# Altium schematic symbol library Componentes_Eletricos.SchLib: 98 symbols
Pins are listed as number, name and electrical type; pins without a type are passive.

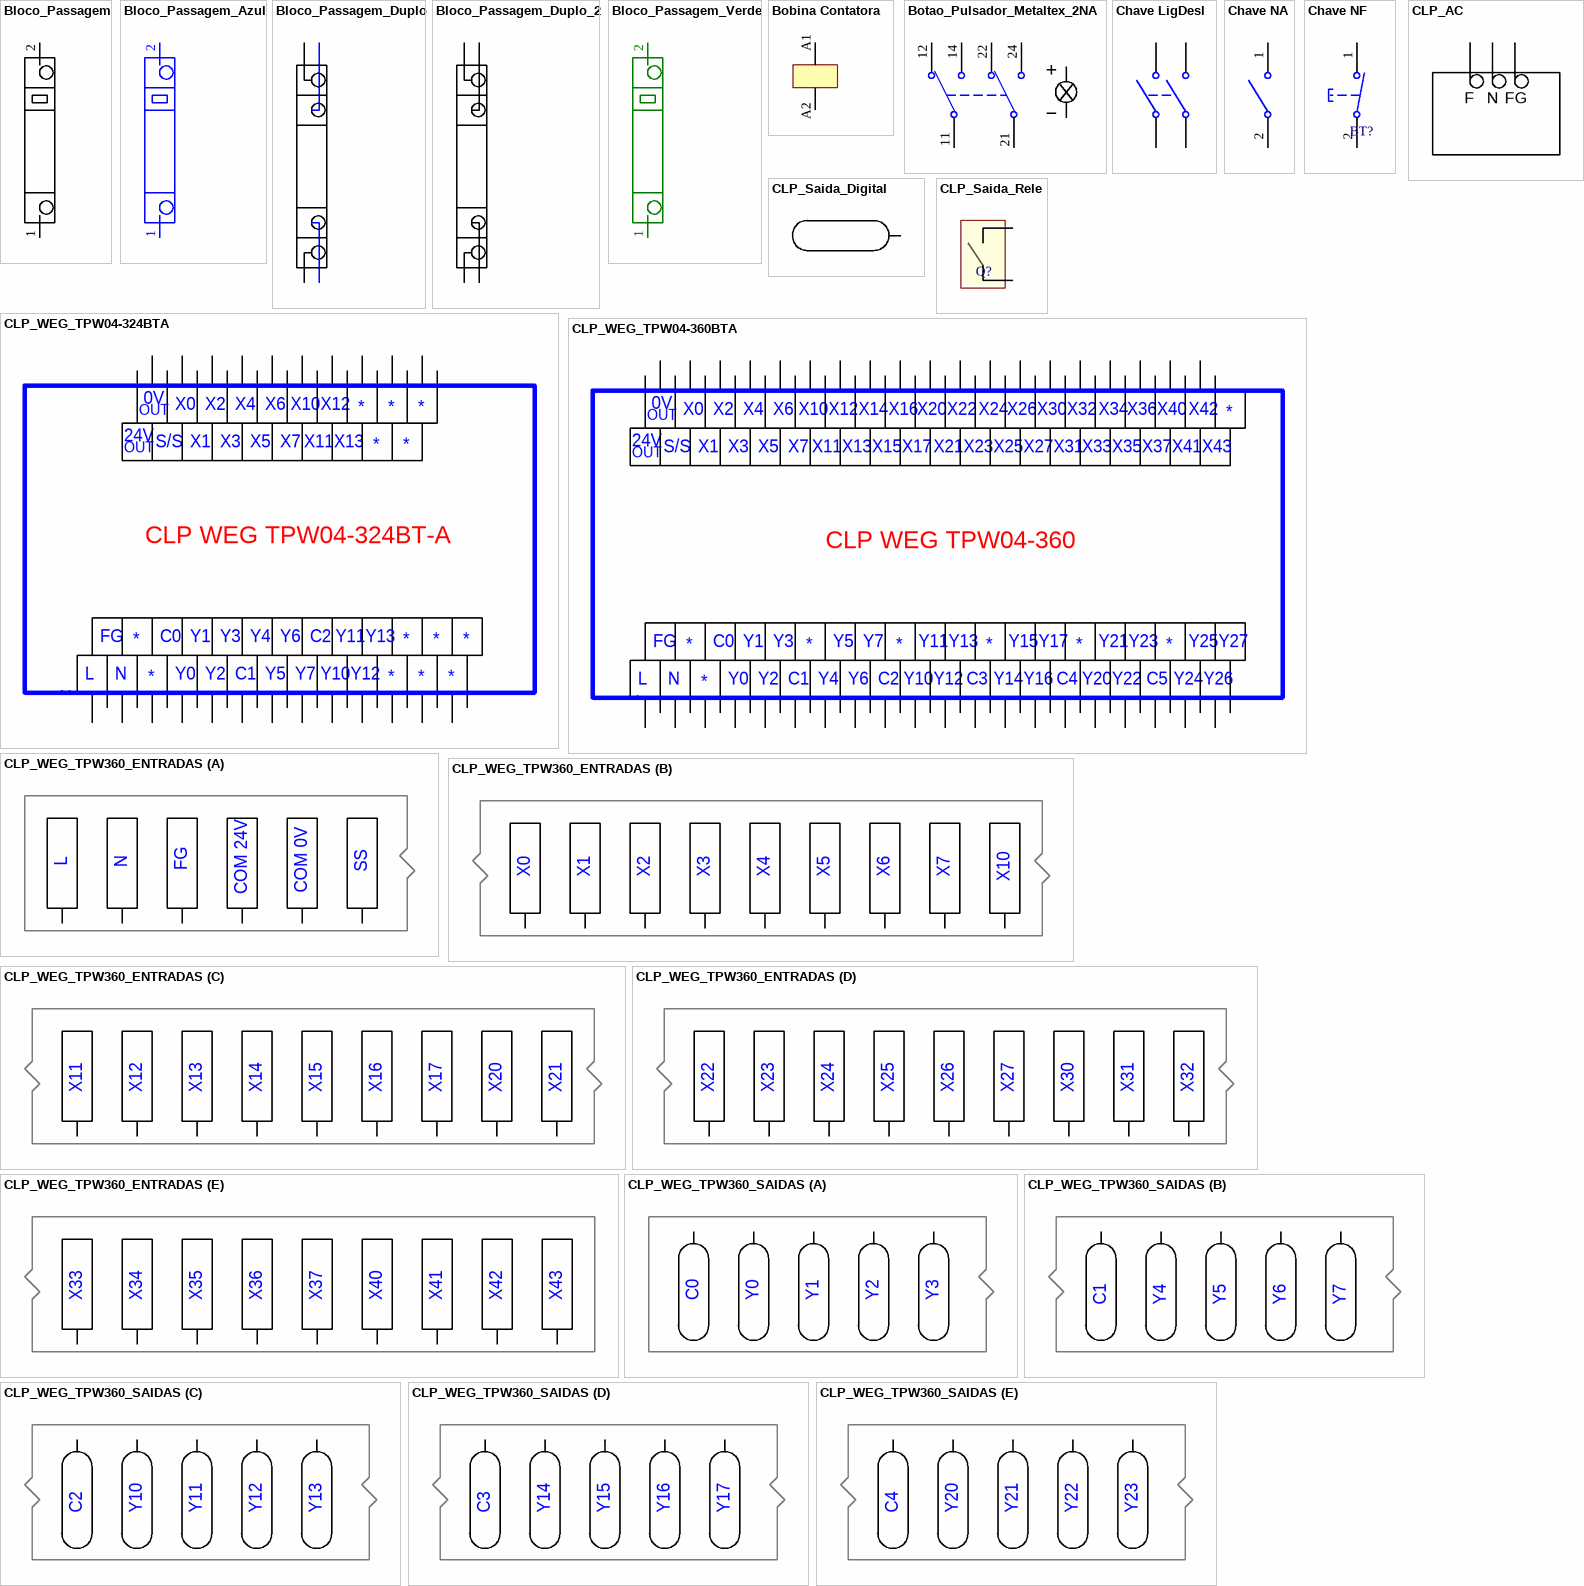
[diagram p0: symbols Bloco_Passagem to CLP_WEG_TPW360_SAIDAS]

## Bloco_Passagem
designator Bloco?  (value not drawn)
pins: 1, 2

## Bloco_Passagem_Azul
designator Bloco?  (value not drawn)
pins: 1, 2

## Bloco_Passagem_Duplo
designator Bloco?  (value not drawn)
pins: 1, 2, 3, 4

## Bloco_Passagem_Duplo_2
designator Bloco?  (value not drawn)
pins: 1, 2, 3, 4

## Bloco_Passagem_Verde
designator Bloco?  (value not drawn)
pins: 1, 2

## Bobina Contatora
designator K?  (value not drawn)
pins: A1, A2

## Botao_Pulsador_Metaltex_2NA
designator BOT?  (value not drawn)
pins: 1, 2, 11, 12, 14, 21, 22, 24

## Chave LigDesl
designator SW?  (value not drawn)
pins: 13, 14, 23, 24

## Chave NA
designator BT?  (value not drawn)
pins: 1, 2

## Chave NF
designator BT?  (value not drawn)
pins: 1, 2

## CLP_AC
designator CLP?  (value not drawn)
pins: 6, 7, 8
text: F; N; FG

## CLP_Saida_Digital
designator Q?  (value not drawn)
pins: Q?

## CLP_Saida_Rele
designator Q?  (value not drawn)
pins: C, NA

## CLP_WEG_TPW04-324BTA
designator Q?  (value not drawn)
pins: 1, 2, 3, 4, 5, 6, 7, 8, 9, 10, 11, 12, 13, 14, 15, 16, 17, 18, 19, 20, 21, 22, 23, 24, 25, 26, 41, 42, 43, 44, 45, 46, 47, 48, 49, 50, 51, 52, 53, 54, 55, 56, 57, 58, 59, 60, 61
text: 0V; X0; X2; X4; X6; X10; X12; OUT; 24V; S/S; X1; X3; X5; X7; X11; X13; CLP WEG TPW04-324BT-A; FG; C0; Y1; Y3; Y4; Y6; C2; Y11; Y13; L; N; Y0; Y2; C1; Y5; Y7; Y10; Y12

## CLP_WEG_TPW04-360BTA
designator Q?  (value not drawn)
pins: 1, 2, 3, 4, 5, 6, 7, 8, 9, 10, 11, 12, 13, 14, 15, 16, 17, 18, 19, 20, 21, 22, 23, 24, 25, 26, 27, 28, 29, 30, 31, 32, 33, 34, 35, 36, 37, 38, 39, 40, 41, 42, 43, 44, 45, 46, 47, 48, 49, 50, 51, 52, 53, 54, 55, 56, 57, 58, 59, 60, 61, 62, 63, 64, 65, 66, 67, 68, 69, 70, 71, 72, 73, 74, 75, 76, 77, 78, 79
text: 0V; X0; X2; X4; X6; X10; X12; X14; X16; X20; X22; X24; X26; X30; X32; X34; X36; X40; X42; OUT; 24V; S/S; X1; X3; X5; X7; X11; X13; X15; X17; X21; X23; X25; X27; X31; X33; X35; X37; X41; X43; CLP WEG TPW04-360; FG; C0; Y1; Y3; Y5; Y7; Y11; Y13; Y15; Y17; Y21; Y23; Y25; Y27; L; N; Y0; Y2; C1; Y4; Y6; C2; Y10; Y12; C3; Y14; Y16; C4; Y20; Y22; C5; Y24; Y26

## CLP_WEG_TPW360_ENTRADAS
designator Inputs  (value not drawn)
part A pins: Q?, Q?, Q?, Q?, Q?, Q?
part B pins: Q?, Q?, Q?, Q?, Q?, Q?, Q?, Q?, Q?
part C pins: Q?, Q?, Q?, Q?, Q?, Q?, Q?, Q?, Q?
part D pins: Q?, Q?, Q?, Q?, Q?, Q?, Q?, Q?, Q?
part E pins: Q?, Q?, Q?, Q?, Q?, Q?, Q?, Q?, Q?
part A text: L; N; FG; SS; COM 24V; COM 0V
part B text: X0; X1; X2; X3; X4; X5; X6; X7; X10
part C text: X11; X12; X13; X14; X15; X16; X17; X20; X21
part D text: X22; X23; X24; X25; X26; X27; X30; X31; X32
part E text: X33; X34; X35; X36; X37; X40; X41; X42; X43

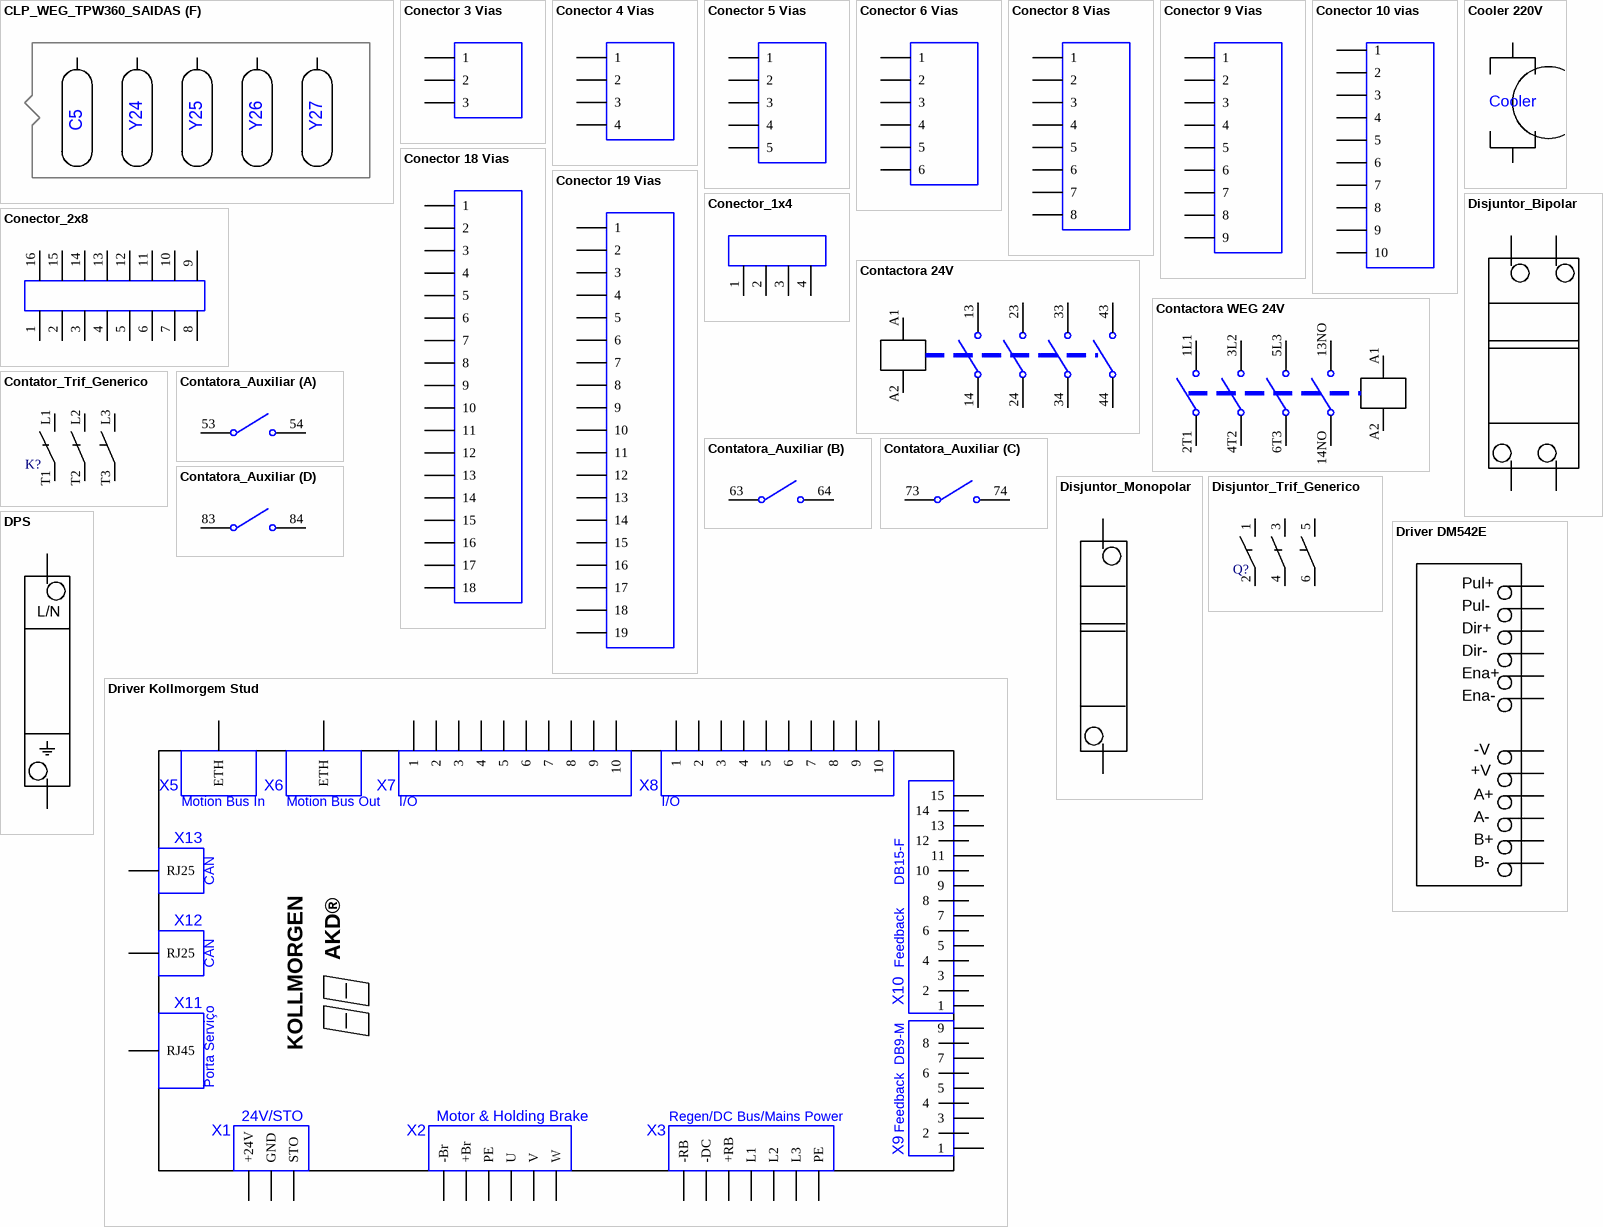
[diagram p1: symbols CLP_WEG_TPW360_SAIDAS to Driver Kollmorgem Stud]

## CLP_WEG_TPW360_SAIDAS
designator U?
part A pins: Q?, Q?, Q?, Q?, Q?
part B pins: Q?, Q?, Q?, Q?, Q?
part C pins: Q?, Q?, Q?, Q?, Q?
part D pins: Q?, Q?, Q?, Q?, Q?
part E pins: Q?, Q?, Q?, Q?, Q?
part F pins: Q?, Q?, Q?, Q?, Q?
part A text: C0; Y0; Y1; Y2; Y3
part B text: C1; Y4; Y5; Y6; Y7
part C text: C2; Y10; Y11; Y12; Y13
part D text: C3; Y14; Y15; Y16; Y17
part E text: C4; Y20; Y21; Y22; Y23
part F text: C5; Y24; Y25; Y26; Y27

## Conector 3 Vias
designator CN?  (value not drawn)
pins: 1, 2, 3

## Conector 4 Vias
designator CN?  (value not drawn)
pins: 1, 2, 3, 4

## Conector 5 Vias
designator CN?  (value not drawn)
pins: 1, 2, 3, 4, 5

## Conector 6 Vias
designator CN?  (value not drawn)
pins: 1, 2, 3, 4, 5, 6

## Conector 8 Vias
designator CN?  (value not drawn)
pins: 1, 2, 3, 4, 5, 6, 7, 8

## Conector 9 Vias
designator CN?  (value not drawn)
pins: 1, 2, 3, 4, 5, 6, 7, 8, 9

## Conector 10 vias
designator CN_?  (value not drawn)
pins: 1, 2, 3, 4, 5, 6, 7, 8, 9, 10

## Conector 18 Vias
designator CN?  (value not drawn)
pins: 1, 2, 3, 4, 5, 6, 7, 8, 9, 10, 11, 12, 13, 14, 15, 16, 17, 18

## Conector 19 Vias
designator CN?  (value not drawn)
pins: 1, 2, 3, 4, 5, 6, 7, 8, 9, 10, 11, 12, 13, 14, 15, 16, 17, 18, 19

## Conector_1x4
designator CN?  (value not drawn)
pins: 1, 2, 3, 4

## Conector_2x8
designator CN?  (value not drawn)
pins: 1, 2, 3, 4, 5, 6, 7, 8, 9, 10, 11, 12, 13, 14, 15, 16

## Contactora 24V
designator K?  (value not drawn)
pins: 13, 14, 23, 24, 33, 34, 43, 44, A1, A2

## Contactora WEG 24V
designator K?  (value not drawn)
pins: 1L1, 2T1, 3L2, 4T2, 5L3, 6T3, 13NO, 14NO, A1, A2

## Contator_Trif_Generico
designator K?, comment Contator Trifasico  (value not drawn)
pins: L1, L2, L3, T1, T2, T3

## Contatora_Auxiliar
designator CNA?, comment Contato Auxiliar  (value not drawn)
CNA-4M
part A pins: 53, 54
part B pins: 63, 64
part C pins: 73, 74
part D pins: 83, 84

## Cooler 220V
designator C?  (value not drawn)
pins: F, N
text: Cooler

## Disjuntor_Bipolar
designator DSJ?  (value not drawn)
pins: 1, 1, 1, 1

## Disjuntor_Monopolar
designator DSJ?  (value not drawn)
pins: 1, 1

## Disjuntor_Trif_Generico
designator Q?, comment Disjuntor Trifasico  (value not drawn)
pins: 1, 2, 3, 4, 5, 6

## DPS
designator DPS?  (value not drawn)
pins: 1, 1
text: L/N

## Driver DM542E
designator DRV?  (value not drawn)
pins: 6, 6, 6, 6, 7, 7, 7, 7, 8, 8, 8, 8
text: Pul+; Pul-; Dir+; Dir-; Ena+; Ena-; -V; +V; A+; A-; B+; B-

## Driver Kollmorgem Stud
designator Driver?  (value not drawn)
pins: 1 +24V, 1 -Br, 1 -RB, 1, 1, 1, 1, 2 GND, 2 +Br, 2 -DC, 2 ETH, 2 ETH, 2, 2, 2, 2 RJ25, 2 RJ25, 2 RJ45, 2, 3 STO, 3 PE, 3 +RB, 3, 3, 3, 3, 4 U, 4 L1, 4, 4, 4, 4, 5 V, 5 L2, 5, 5, 5, 5, 6 W, 6 L3, 6, 6, 6, 6, 7 PE, 7, 7, 7, 7, 8, 8, 8, 8, 9, 9, 9, 9, 10, 10, 10, 11, 12, 13, 14, 15
text: X5; X6; X7; X8; Motion Bus In; Motion Bus Out; I/O; X13; CAN; DB15-F; X12; AKD®; Feedback; X10; X11; KOLLMORGEN; DB9-M; Porta Serviço; 24V/STO; Motor & Holding Brake; Regen/DC Bus/Mains Power; X1; X2; X3; X9

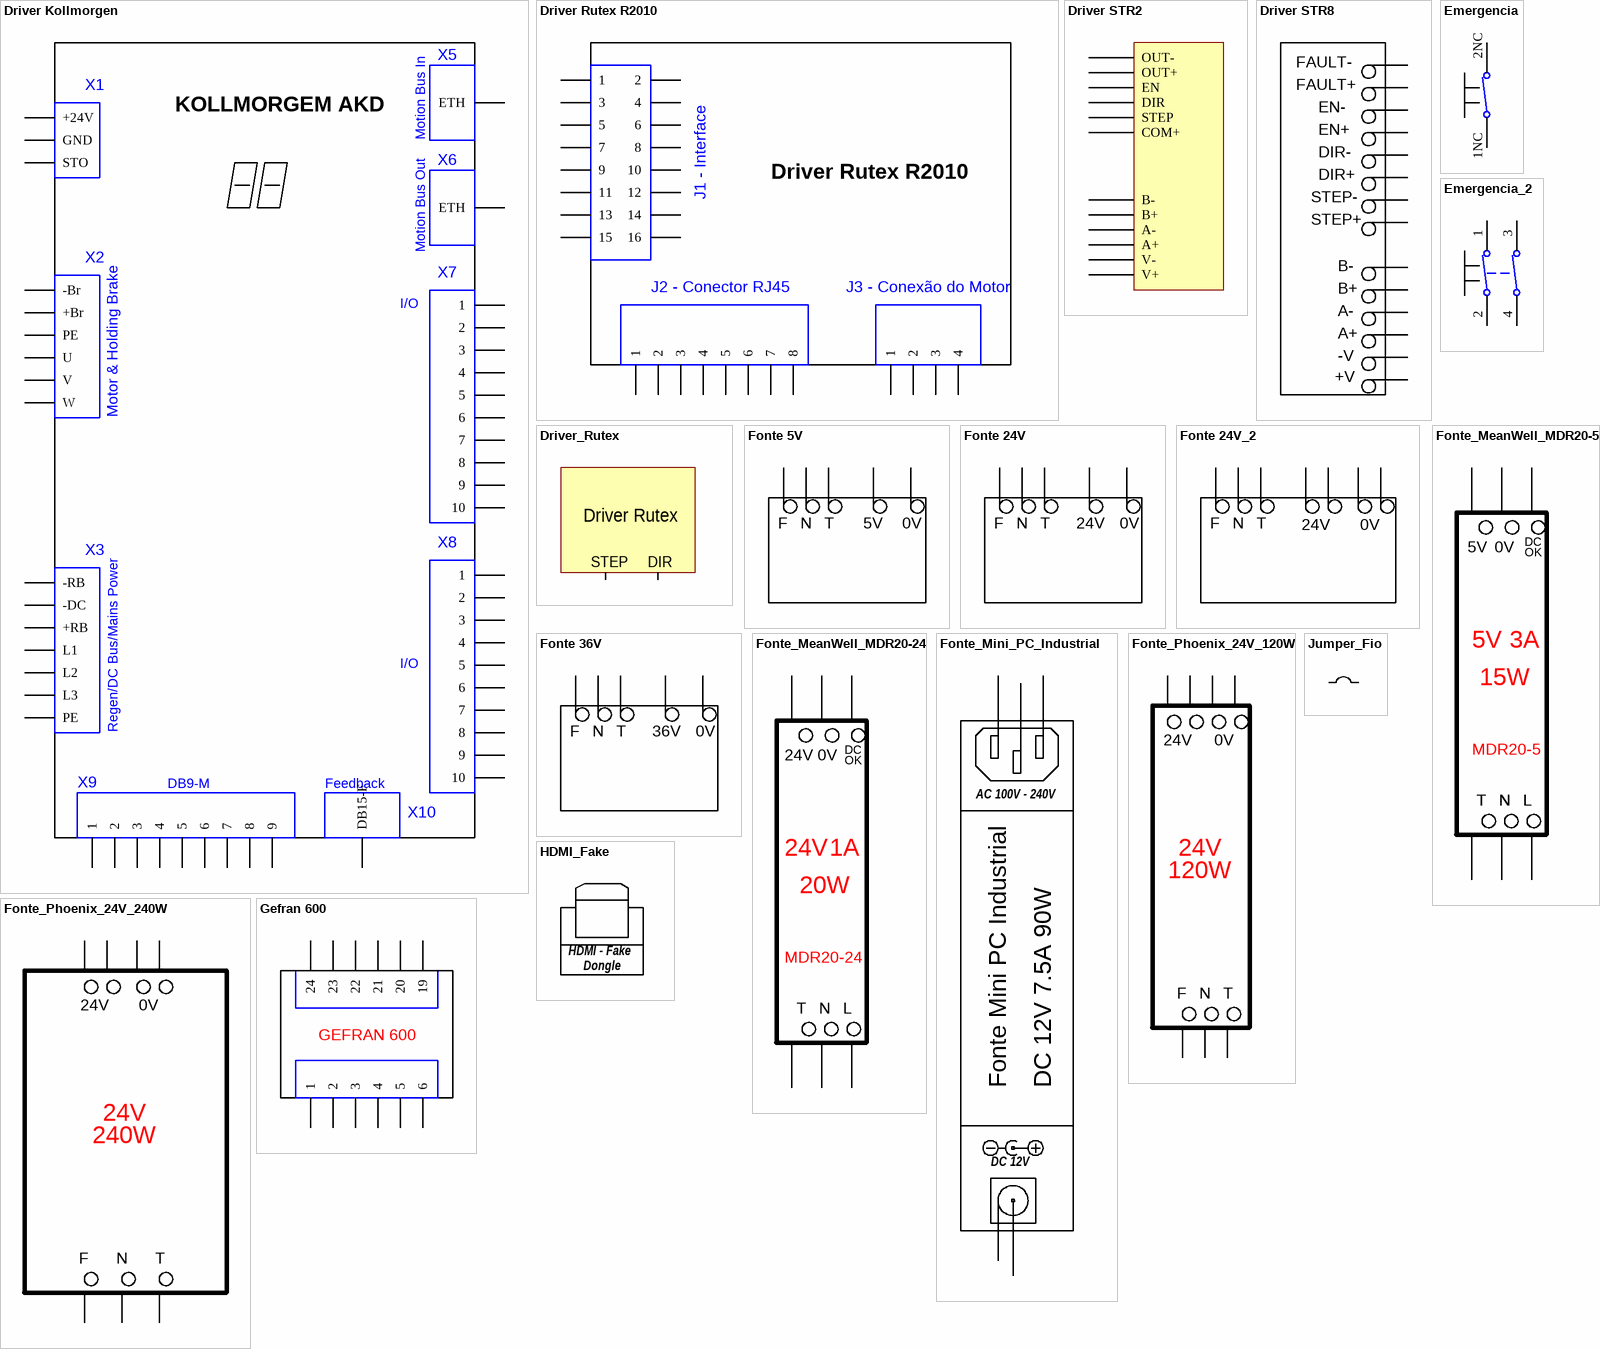
[diagram p2: symbols Driver Kollmorgen to Jumper_Fio]

## Driver Kollmorgen
designator DRV?  (value not drawn)
pins: 1 +24V, 1 -Br, 1 -RB, 1, 1, 1, 2 GND, 2 +Br, 2 -DC, 2 ETH, 2 ETH, 2, 2, 2 DB15-F, 2, 3 STO, 3 PE, 3 +RB, 3, 3, 3, 4 U, 4 L1, 4, 4, 4, 5 V, 5 L2, 5, 5, 5, 6 W, 6 L3, 6, 6, 6, 7 PE, 7, 7, 7, 8, 8, 8, 9, 9, 9, 10, 10
text: X5; X1; KOLLMORGEM AKD; Motion Bus In; X6; Motion Bus Out; X2; X7; I/O; Motor & Holding Brake; X8; X3; Regen/DC Bus/Mains Power; X9; DB9-M; Feedback; X10

## Driver Rutex R2010
designator DRV?  (value not drawn)
100V/20A brush motors
pins: 1, 1, 1, 2, 2, 2, 3, 3, 3, 4, 4, 4, 5, 5, 6, 6, 7, 7, 8, 8, 9, 10, 11, 12, 13, 14, 15, 16
text: J1 - Interface; J2 - Conector RJ45; J3 - Conexão do Motor

## Driver STR2
designator DRV?  (value not drawn)
pins: 2 COM+, 2 EN, 3 STEP, 4 DIR, 5 OUT+, 6 OUT-, 7 V-, 8 V+, 9 A+, 10 A-, 11 B+, 12 B-

## Driver STR8
designator DRV?  (value not drawn)
pins: 6, 6, 6, 6, 7, 7, 7, 7, 8, 8, 8, 8, 8, 8
text: FAULT-; FAULT+; EN-; EN+; DIR-; DIR+; STEP-; STEP+; B-; B+; A-; A+; -V; +V

## Driver_Rutex
designator *  (value not drawn)
pins: C, C
text: Driver Rutex; STEP; DIR

## Emergencia
designator EM?  (value not drawn)
pins: 1NC, 2NC

## Emergencia_2
designator EM?  (value not drawn)
pins: 1, 2, 3, 4

## Fonte 5V
designator FT?  (value not drawn)
pins: 6, 7, 8, 9, 10
text: F; N; T; 5V; 0V

## Fonte 24V
designator FT?  (value not drawn)
pins: 6, 7, 8, 9, 10
text: F; N; T; 24V; 0V

## Fonte 24V_2
designator FT?  (value not drawn)
pins: 6, 7, 8, 9, 9, 10, 10
text: F; N; T; 24V; 0V

## Fonte 36V
designator FT?  (value not drawn)
pins: 6, 7, 8, 9, 10
text: F; N; T; 36V; 0V

## Fonte_MeanWell_MDR20-5
designator *  (value not drawn)  (graphical)
pins: ?1, ?2, ?3, ?4, ?5, ?6
1 alternate drawing of the same symbol
text: DC; 5V; 0V; OK; 3A; 15W; MDR20-5; T; N; L

## Fonte_MeanWell_MDR20-24
designator FT?  (value not drawn)  (graphical)
pins: ?1, ?2, ?3, ?4, ?5, ?6
1 alternate drawing of the same symbol
text: DC; 24V; 0V; OK; 1A; 20W; MDR20-24; T; N; L

## Fonte_Mini_PC_Industrial
designator ?
pins: ?1, ?2, ?3, ?4, ?5
3 alternate drawings of the same symbol
text: AC 100V - 240V; Fonte Mini PC Industrial; DC 12V 7.5A 90W; DC 12V

## Fonte_Phoenix_24V_120W
designator FT?  (value not drawn)  (graphical)
pins: 0V1, 0V2, 24V1, 24V2, F, N, T
1 alternate drawing of the same symbol
text: 24V; 0V; 120W

## Fonte_Phoenix_24V_240W
designator FT?  (value not drawn)  (graphical)
pins: 0V1, 0V2, 24V1, 24V2, F, N, T
1 alternate drawing of the same symbol
text: 24V; 0V; 240W

## Gefran 600
designator C?, comment Controlador Gefran 600  (value not drawn)
Controlador de temperatura da mesa aquecida modelo Gefran 600; Partnumber: 600-R-D-R-0-1
pins: 1, 2, 3, 4, 5, 6, 19, 20, 21, 22, 23, 24
text: GEFRAN 600

## HDMI_Fake
designator *  (value not drawn)
text: HDMI - Fake; Dongle

## Jumper_Fio
designator u?  (value not drawn)
pins: 1, 2

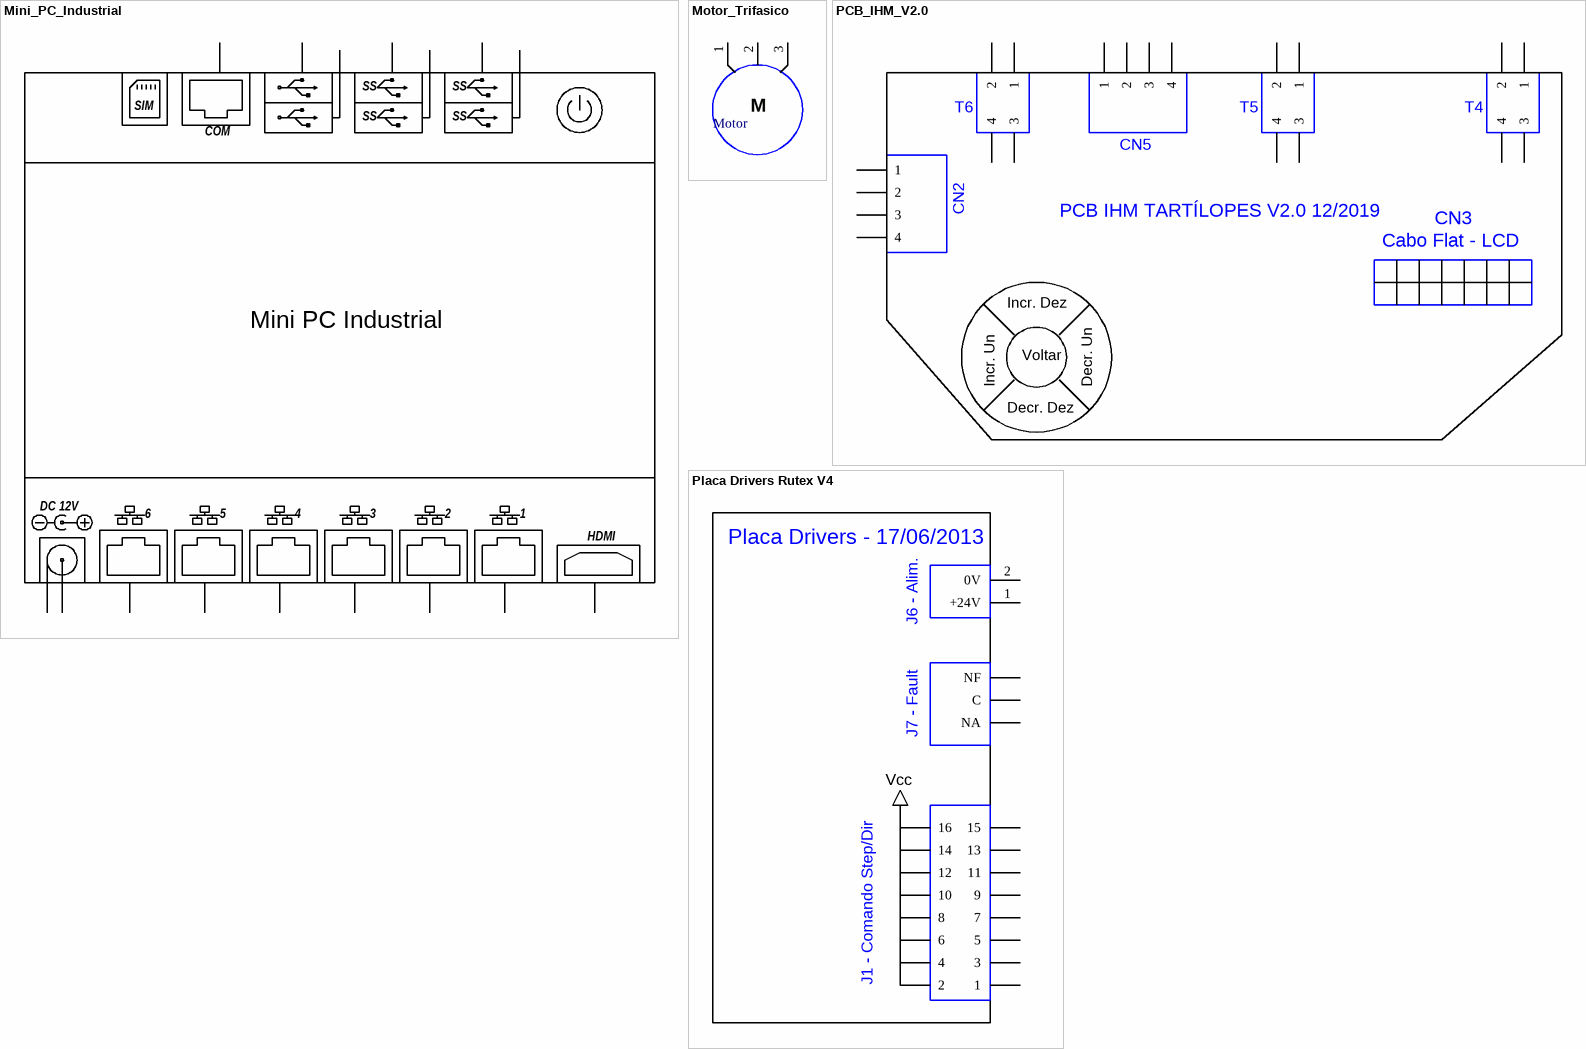
[diagram p3: symbols Mini_PC_Industrial to Placa Drivers Rutex V4]

## Mini_PC_Industrial
designator *  (value not drawn)
pins: 1, 1, 2, 2, 3, 3, 4, 4, 5, 5, 6, 6, 7, 7, 8, 9
1 alternate drawing of the same symbol
text: SS; SIM; COM; Mini PC Industrial; DC 12V; HDMI

## Motor_Trifasico
designator Motor  (value not drawn)
pins: 1, 2, 3
text: M

## PCB_IHM_V2.0
designator PL?  (value not drawn)
pins: 1, 1, 1, 1, 1, 2, 2, 2, 2, 2, 3, 3, 3, 3, 3, 4, 4, 4, 4, 4
text: T6; T5; T4; CN5; CN2; PCB IHM TARTÍLOPES V2.0 12/2019; CN3; Cabo Flat - LCD; Incr. Dez; Voltar; Incr. Un; Decr. Un; Decr. Dez

## Placa Drivers Rutex V4
designator PL?  (value not drawn)
pins: 1, 1 +24V, 1 C, 1 NA, 2, 2 0V, 2 NF, 3, 4, 5, 6, 7, 8, 9, 10, 11, 12, 13, 14, 15, 16
text: Placa Drivers - 17/06/2013; J6 - Alim.; J7 - Fault; Vcc; J1 - Comando Step/Dir

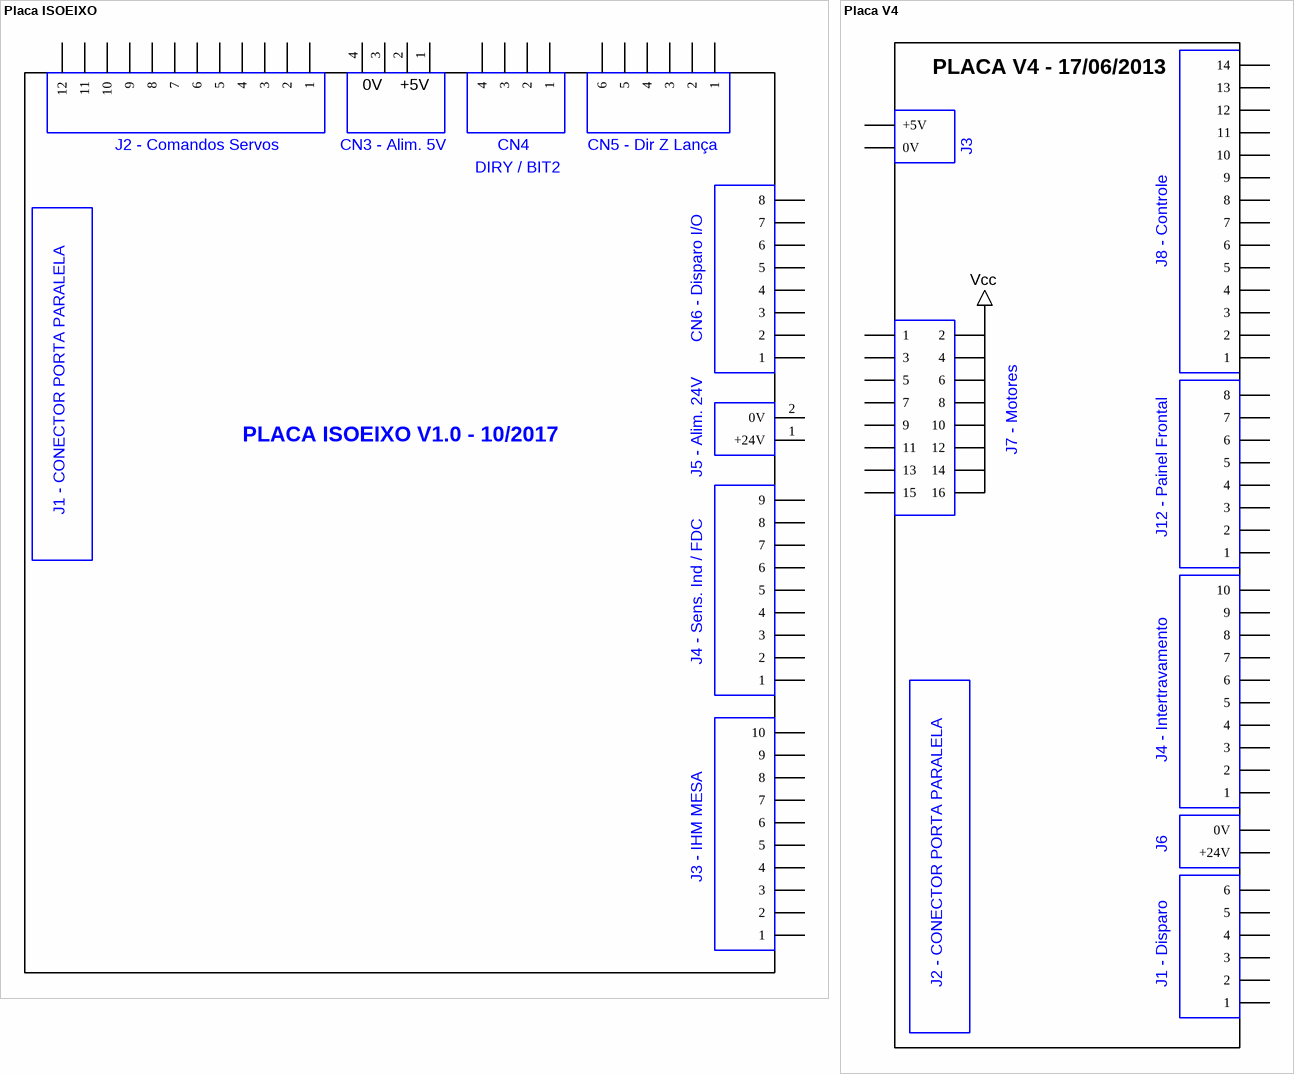
[diagram p4: symbols Placa ISOEIXO to Placa V4]

## Placa ISOEIXO
designator PL?  (value not drawn)
pins: 1, 1, 1 +24V, 1, 1, 1, 1, 1 +5V, 2, 2, 2 0V, 2, 2, 2, 2, 2 +5V, 3, 3, 3, 3, 3, 3, 3, 4, 4, 4, 4, 4, 4, 4, 5, 5, 5, 5, 5, 6, 6, 6, 6, 6, 7, 7, 7, 7, 8, 8, 8, 8, 9, 9, 9, 10, 10, 11, 12
text: J2 - Comandos Servos; CN3 - Alim. 5V; CN4; CN5 - Dir Z Lança; DIRY / BIT2; CN6 - Disparo I/O; PLACA ISOEIXO V1.0 - 10/2017; J5 - Alim. 24V; J1 - CONECTOR PORTA PARALELA; J4 - Sens. Ind / FDC; J3 - IHM MESA

## Placa V4
designator PL?  (value not drawn)
pins: 1, 1, 1, 1 +24V, 1, 1, 1 +5V, 2, 2, 2, 2 0V, 2, 2, 2 0V, 3, 3, 3, 3, 3, 4, 4, 4, 4, 4, 5, 5, 5, 5, 5, 6, 6, 6, 6, 6, 7, 7, 7, 7, 8, 8, 8, 8, 9, 9, 9, 10, 10, 10, 11, 11, 12, 12, 13, 13, 14, 14, 15, 16
text: PLACA V4 - 17/06/2013; J3; J8 - Controle; Vcc; J7 - Motores; J12 - Painel Frontal; J4 - Intertravamento; J6; J2 - CONECTOR PORTA PARALELA; J1 - Disparo

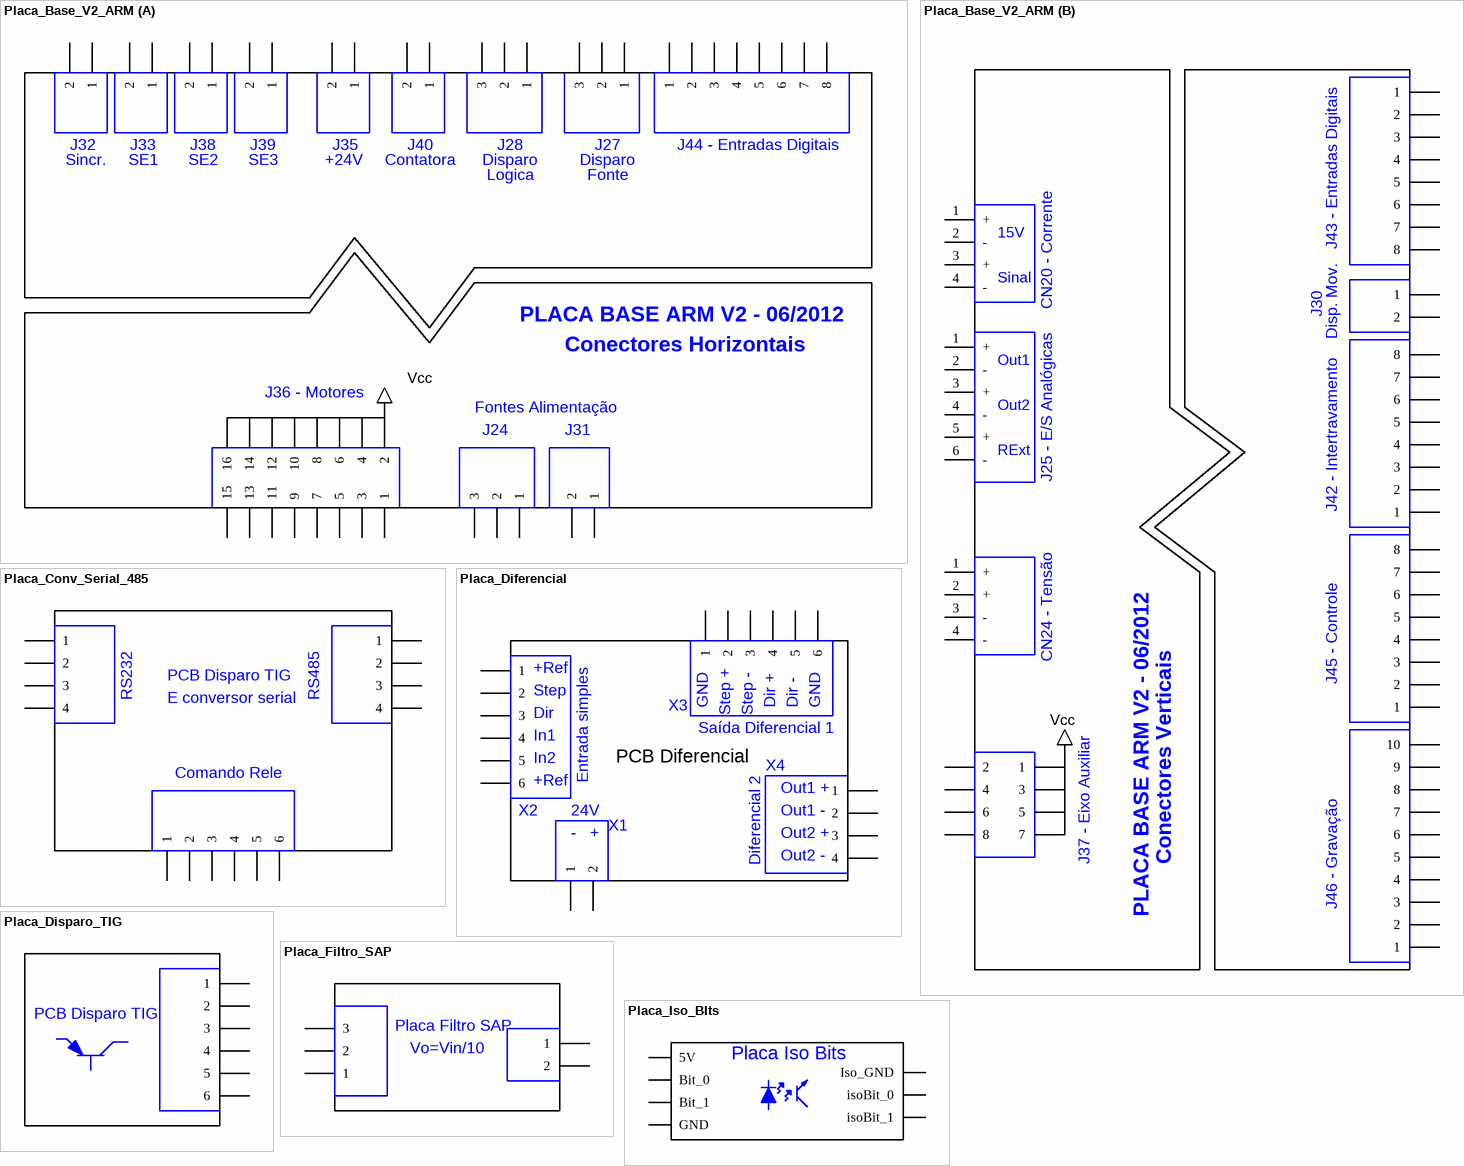
[diagram p5: symbols Placa_Base_V2_ARM to Placa_Iso_BIts]

## Placa_Base_V2_ARM
designator PL?  (value not drawn)
part A pins: 1, 1, 1, 1, 1, 1, 1, 1, 1, 1, 1, 1, 2, 2, 2, 2, 2, 2, 2, 2, 2, 2, 2, 2, 3, 3, 3, 3, 3, 4, 4, 5, 5, 6, 6, 7, 7, 8, 8, 9, 10, 11, 12, 13, 14, 15, 16
part B pins: 1, 1, 1, 1, 1, 1 +, 1 +, 1 +, 1, 2, 2, 2, 2, 2, 2 -, 2 -, 2 +, 2, 3, 3, 3, 3, 3 +, 3 +, 3 -, 3, 4, 4, 4, 4, 4 -, 4 -, 4 -, 4, 5, 5, 5, 5, 5 +, 5, 6, 6, 6, 6, 6 -, 6, 7, 7, 7, 7, 7, 8, 8, 8, 8, 8, 9, 10
part A text: J32; J33; J38; J39; J35; J40; J28; J27; J44 - Entradas Digitais; Sincr.; SE1; SE2; SE3; +24V; Contatora; Disparo; Logica; Fonte; PLACA BASE ARM V2 - 06/2012; Conectores Horizontais; Vcc; J36 - Motores; Fontes Alimentação; J24; J31
part B text: 15V; J43 - Entradas Digitais; Sinal; CN20 - Corrente; J30; Disp. Mov.; Out1; Out2; RExt; J25 - E/S Analógicas; J42 - Intertravamento; CN24 - Tensão; J45 - Controle; Vcc; J37 - Eixo Auxiliar; Conectores Verticais; J46 - Gravação; PLACA BASE ARM V2 - 06/2012

## Placa_Conv_Serial_485
designator PL?  (value not drawn)
Placa para conversão da comunicação Serial via RS232 para RS485, com acionamento de relé
pins: 1, 1, 1, 2, 2, 2, 3, 3, 3, 4, 4, 4, 5, 6
text: PCB Disparo TIG; RS232; RS485; E conversor serial; Comando Rele

## Placa_Diferencial
designator Diferencial*  (value not drawn)
Conversor sinal step dir para diferencial
pins: 1, 1, 1, 1, 2, 2, 2, 2, 3, 3, 3, 4, 4, 4, 5, 5, 6, 6
text: +Ref; Step; GND; Dir +; Dir -; X3; Step +; Step -; Dir; Saída Diferencial 1; In1; In2; PCB Diferencial; X4; Entrada simples; Out1 +; X2; 24V; Out1 -; X1; -   +; Out2 +; Diferencial 2; Out2 -

## Placa_Disparo_TIG
designator PL?  (value not drawn)
Placa de Adaptação do sinal do Sinc- para acionamento de relé com transistor PNP
pins: 1, 2, 3, 4, 5, 6
text: PCB Disparo TIG

## Placa_Filtro_SAP
designator PL?  (value not drawn)
pins: 1, 1, 2, 2, 3
text: Placa Filtro SAP; Vo=Vin/10

## Placa_Iso_BIts
designator U?  (value not drawn)
Placa de isolação para os bits 0 e 1
pins: 1 5V, 1 Iso_GND, 2 Bit_0, 3 Bit_1, 4 GND, 5 isoBit_0, 6 isoBit_1
text: Placa Iso Bits

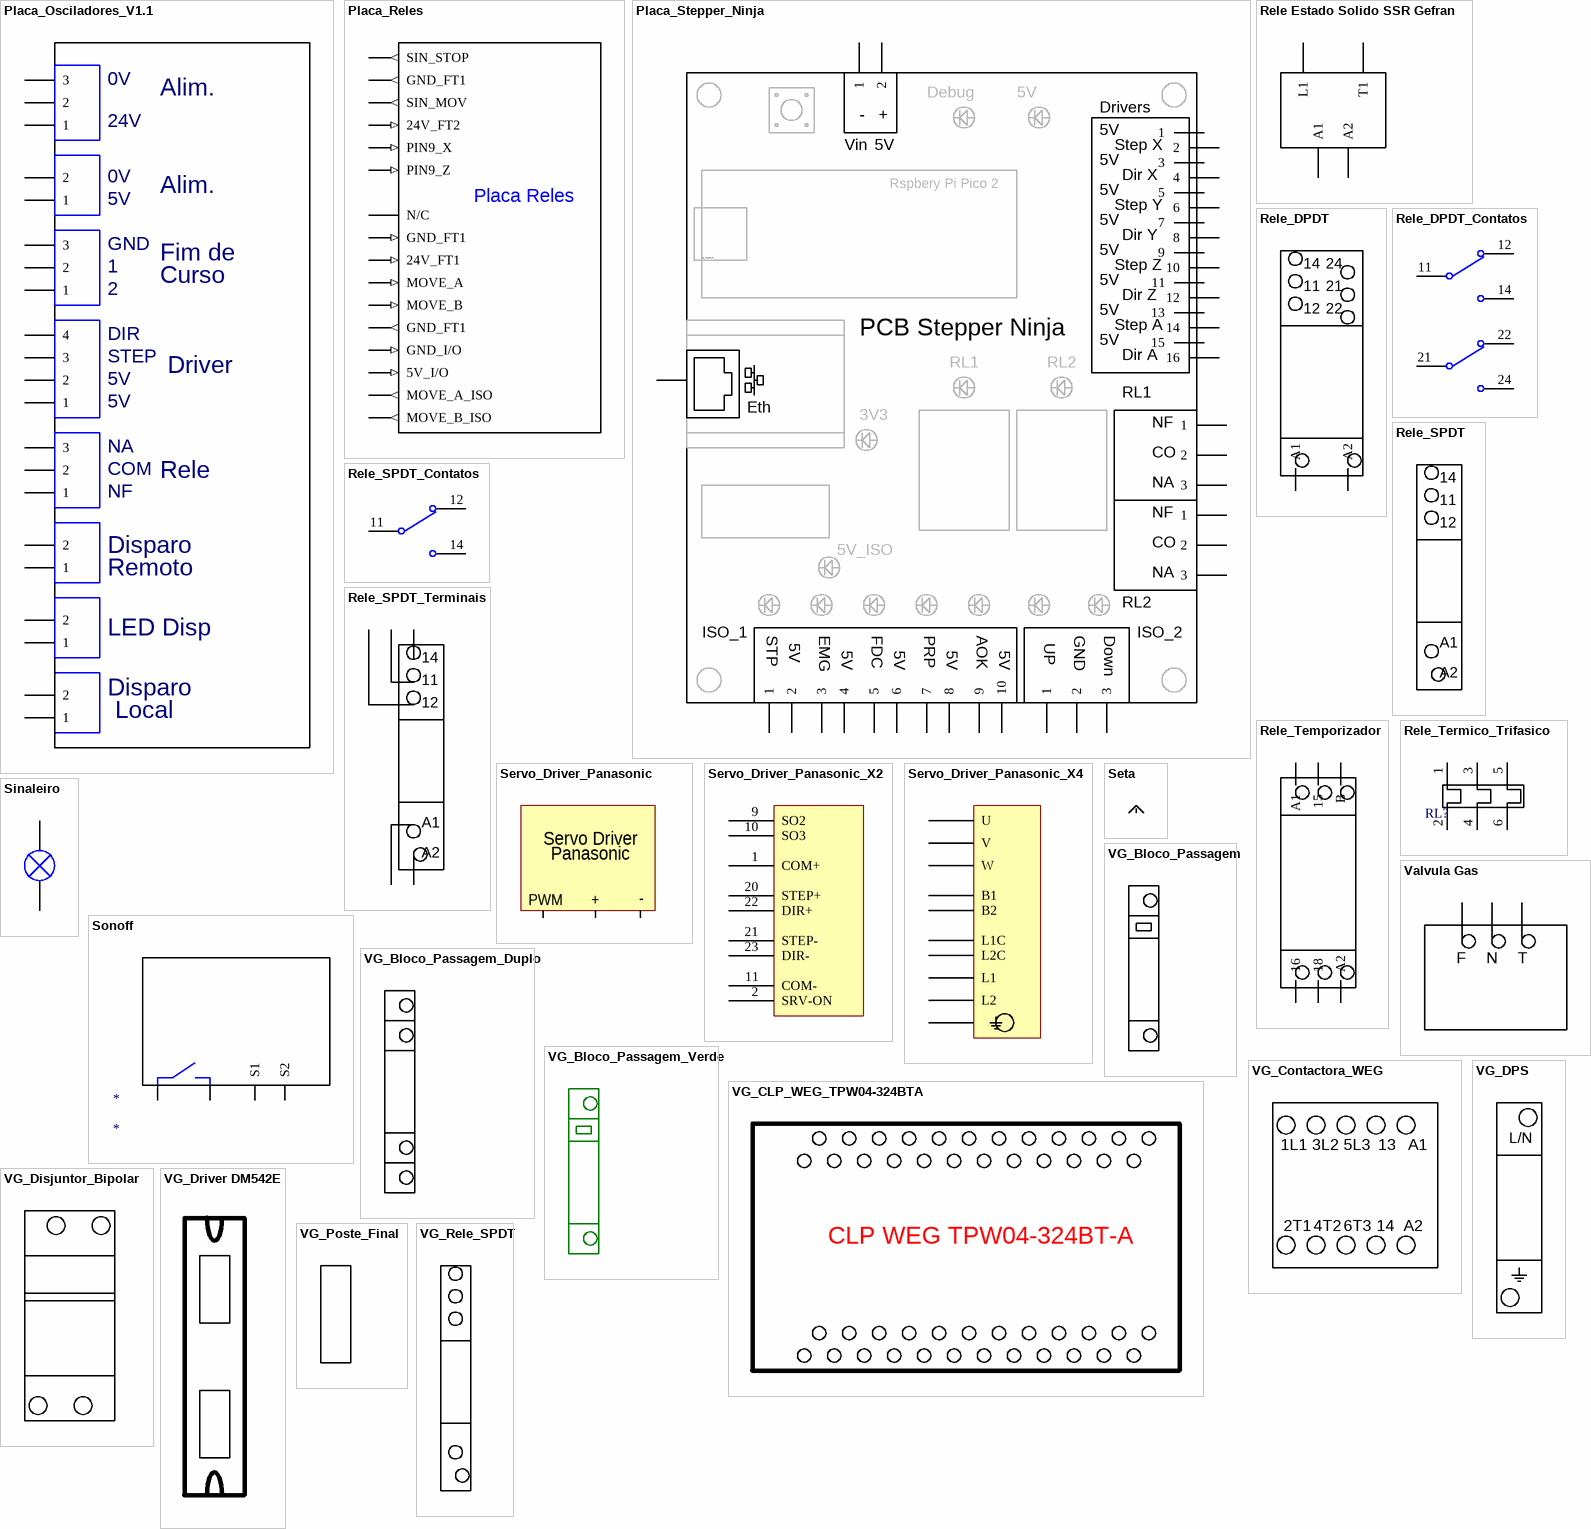
[diagram p6: symbols Placa_Osciladores_V1.1 to VG_Rele_SPDT]

## Placa_Osciladores_V1.1
designator PL?  (value not drawn)
Placa de Adaptação do sinal do Sinc- para acionamento de relé com transistor PNP
pins: 1, 1, 1, 1, 1, 1, 1, 1, 2, 2, 2, 2, 2, 2, 2, 2, 3, 3, 3, 3, 4
text: 0V; Alim.; 24V; 5V; GND; Fim de; Curso; DIR; STEP; Driver; NA; COM; Rele; NF; Disparo; Remoto; LED Disp; Local

## Placa_Reles
designator PL?  (value not drawn)
pins: 1 SIN_STOP (out), 2 SIN_MOV (out), 3 GND_FT1 (out), 4 24V_FT2 (in), 6 PIN9_X (in), 7 PIN9_Z (in), 8 GND_FT1 (in), 8 N/C, 9 24V_FT1 (in), 10 MOVE_A (in), 11 MOVE_B (in), 12 GND_FT1 (out), 13 GND_I/O (in), 14 5V_I/O (in), 15 MOVE_A_ISO (out), 16 MOVE_B_ISO (out)
text: Placa Reles

## Placa_Stepper_Ninja
designator *  (value not drawn)
pins: 1, 1, 1, 1, 1, 1, 1, 2, 2, 2, 2, 2, 2, 3, 3, 3, 3, 3, 4, 4, 5, 5, 6, 6, 7, 7, 8, 8, 9, 9, 10, 10, 11, 12, 13, 14, 15, 16
2 alternate drawings of the same symbol
text: Debug; 5V; Drivers; -   +; Vin; Step X; Dir X; Rspbery Pi Pico 2; Step Y; Dir Y; By: Bonitto ♥; Step Z; Dir Z; Step A; PCB Stepper Ninja; Dir A; RL1; RL2; Eth; 3V3; NF; CO; NA; 5V_ISO; STP; EMG; FDC; PRP; AOK; GND; Down; ISO_1; UP; ISO_2

## Rele Estado Solido SSR Gefran
designator RL?, comment Rele Estado Solido POT  (value not drawn)
Rele de estado sólido de potência Gefran; Partnumber: GQ-50-48-D-1-1
pins: A1, A2, L1, T1

## Rele_DPDT
designator RL?  (value not drawn)
pins: 4 A1, 6 A2
text: 14; 24; 11; 21; 12; 22

## Rele_DPDT_Contatos
designator RL?  (value not drawn)
pins: 11 C1, 12 NF1, 14 NA1, 21 C1, 22 NF1, 24 NA1

## Rele_SPDT
designator RL?  (value not drawn)
text: 14; 11; 12; A1; A2

## Rele_SPDT_Contatos
designator RL?  (value not drawn)
pins: 11 C1, 12 NF1, 14 NA1

## Rele_SPDT_Terminais
designator RL?  (value not drawn)
pins: 1, 2, 3, 4, 5
text: 14; 11; 12; A1; A2

## Rele_Temporizador
designator RL?  (value not drawn)
pins: 1 A1, 2 15, 3 B, 4 16, 5 18, 6 A2

## Rele_Termico_Trifasico
designator RL?, comment Rele Termico Trifasico  (value not drawn)
pins: 1, 2, 3, 4, 5, 6

## Servo_Driver_Panasonic
designator *  (value not drawn)
pins: C, C, C
text: Servo Driver; Panasonic; PWM; +; -

## Servo_Driver_Panasonic_X2
designator X2?, comment Conector X2  (value not drawn)
pins: 1 COM+, 2 SRV-ON, 9 SO2, 10 SO3, 11 COM-, 20 STEP+, 21 STEP-, 22 DIR+, 23 DIR-

## Servo_Driver_Panasonic_X4
designator X4?, comment Conector X4  (value not drawn)
pins: B1, B2, L1, L1C, L2, L2C, T, U, V, W

## Seta
designator S?  (value not drawn)
pins: 14

## Sinaleiro
designator SN?  (value not drawn)
pins: 1, 2

## Sonoff
designator *
pins: C, C S1, NA, NA S2

## Valvula Gas
designator VLV?  (value not drawn)
pins: 6, 7, 8
text: F; N; T

## VG_Bloco_Passagem
designator Bloco?  (value not drawn)  (graphical)

## VG_Bloco_Passagem_Duplo
designator Bloco?  (value not drawn)  (graphical)

## VG_Bloco_Passagem_Verde
designator Bloco?  (value not drawn)  (graphical)

## VG_CLP_WEG_TPW04-324BTA
designator Q?  (value not drawn)  (graphical)
text: CLP WEG TPW04-324BT-A

## VG_Contactora_WEG
designator DSJ?  (value not drawn)  (graphical)
text: 1L1; 3L2; 5L3; 13; A1; 2T1; 4T2; 6T3; 14; A2

## VG_Disjuntor_Bipolar
designator DSJ?  (value not drawn)  (graphical)

## VG_DPS
designator DPS?  (value not drawn)  (graphical)
text: L/N

## VG_Driver DM542E
designator DRV?  (value not drawn)

## VG_Poste_Final
designator Bloco?  (value not drawn)  (graphical)

## VG_Rele_SPDT
designator RL?  (value not drawn)